# Altium footprint library WR-TBL_Pluggable Connector_5.08mm.PcbLib: 295 footprints (part 1 of 19)
Each footprint in its own frame and in the unit in brackets; x right, y up, seen from the top. Pads: shape width x height; smd on the part's side, far side on the other; paste and mask are expansions set on the pad; w line width, h text height; cw(c..) or ccw(c..) is an arc to the next point about the centre after c.
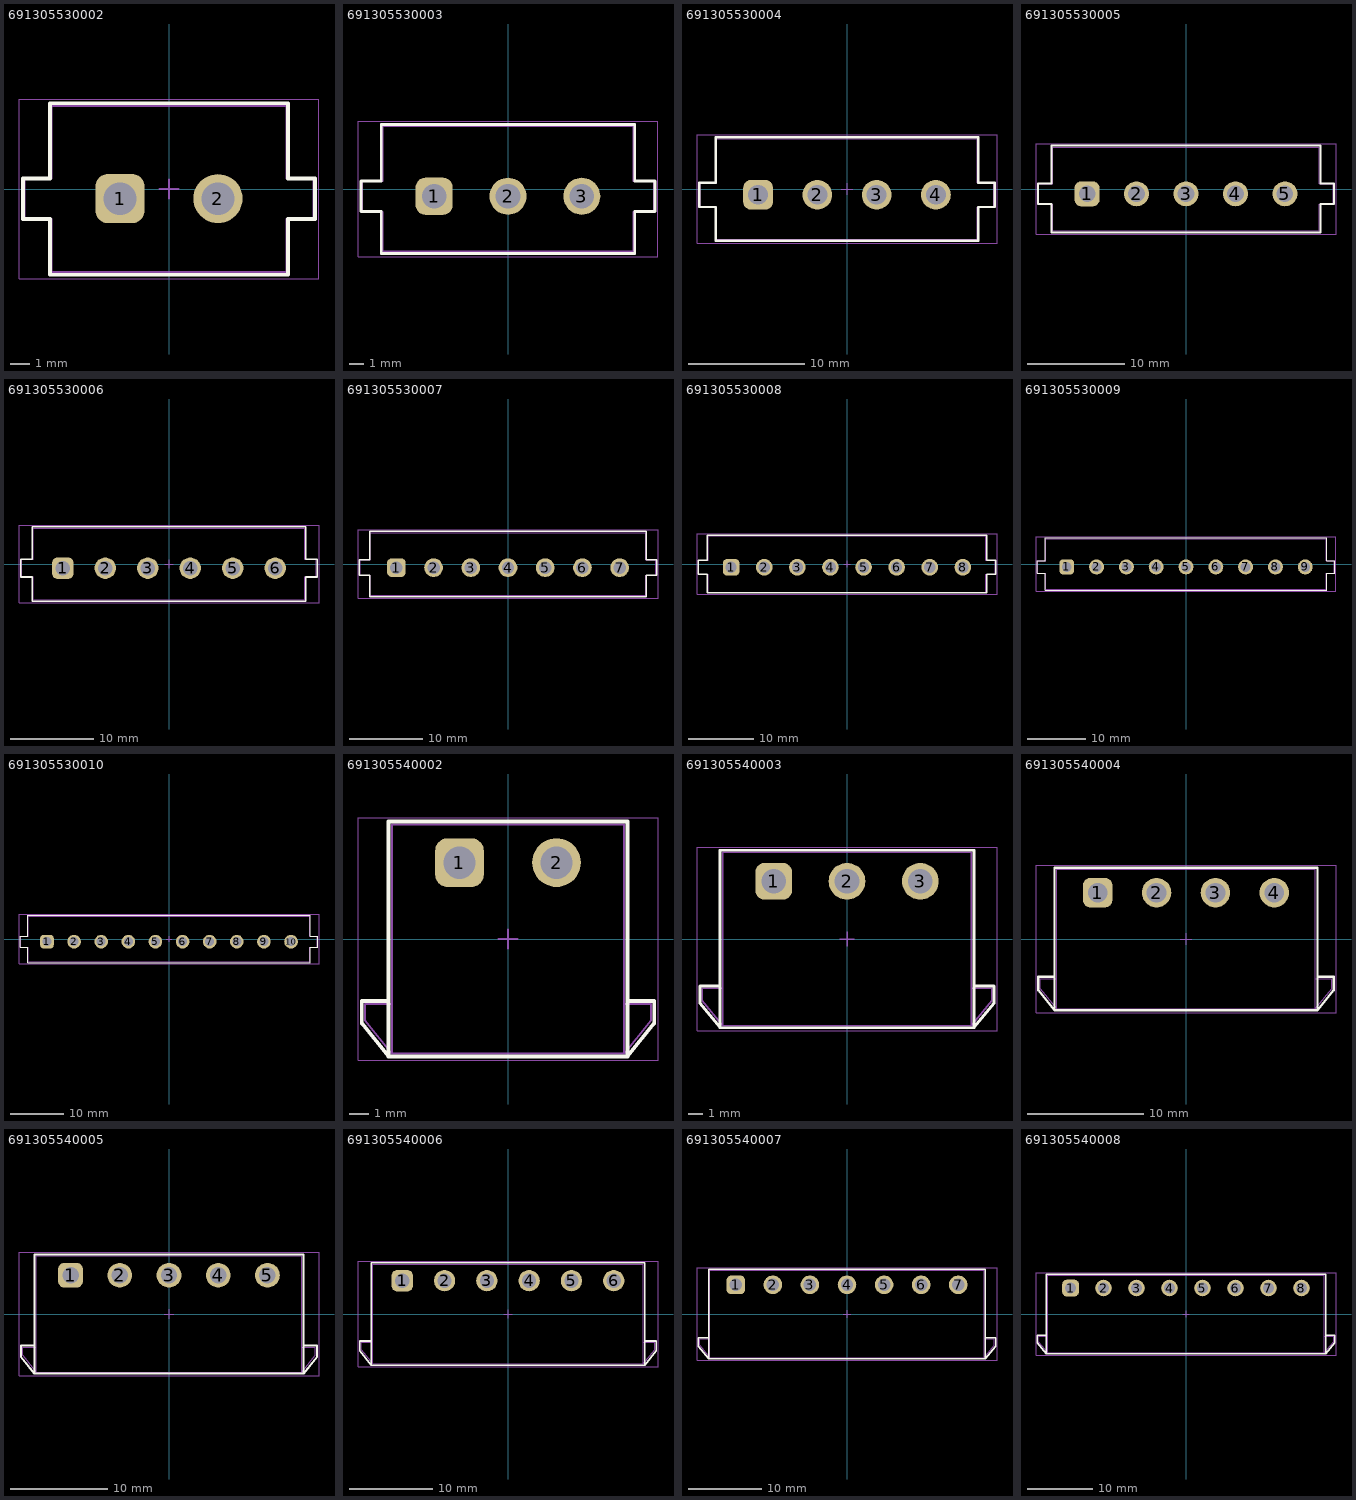
[diagram p0: the footprints below, top view; thin cyan lines are the x and y axes]

## 691305530002 [mm] "5.08mm Vertical PCB Header with Plastic ears, 2p"
height 12.3
pads (2):
  rrect50% 2.55x2.55 hole 1.7: 1(-2.54,-0.5)
  round 2.55 hole 1.7: 2(2.54,-0.5)
Top Overlay:
  lines w0.2: -7.58,-1.55 -6.18,-1.55 -6.18,-4.45 6.18,-4.45 6.18,-1.55 7.58,-1.55 7.58,0.55 6.18,0.55 6.18,4.45 -6.18,4.45 -6.18,0.55 -7.58,0.55 -7.58,-1.55
Top Assembly:
  lines w0.1: -7.48,-1.55 -6.08,-1.55 -6.08,-4.3 6.08,-4.3 6.08,-1.55 7.48,-1.55 7.48,0.55 6.08,0.55 6.08,4.3 -6.08,4.3 -6.08,0.55 -7.48,0.55 -7.48,-1.55
Top Designator:
  text ".Designator" at -3.647,-0.357 h1
Top 3D Body:
  lines w0.1: -7.48,-1.55 -7.48,0.55 -6.08,0.55 -6.08,4.3 6.08,4.3 6.08,0.55 7.48,0.55 7.48,-1.55 6.08,-1.55 6.08,-4.3 -6.08,-4.3 -6.08,-1.55 -7.48,-1.55
Top Courtyard:
  lines w0.05: -7.78,-4.65 7.78,-4.65 7.78,4.65 -7.78,4.65 -7.78,-4.65
Top Component Center:
  lines w0.1: -0.5,0 0.5,0 ; 0,-0.5 0,0.5
3D body "691305530002.stp": height 12.05, standoff -3.95, extent -7.48,-4.3 7.48,4.3

## 691305530003 [mm] "5.08mm Vertical PCB Header with Plastic ears, 3p"
height 12.3
pads (3):
  rrect50% 2.55x2.55 hole 1.7: 1(-5.08,-0.5)
  round 2.55 hole 1.7: 2(0,-0.5) 3(5.08,-0.5)
Top Overlay:
  lines w0.2: -10.12,-1.55 -10.12,0.55 -8.72,0.55 -8.72,4.45 8.72,4.45 8.72,0.55 10.12,0.55 10.12,-1.55 8.72,-1.55 8.72,-4.45 -8.72,-4.45 -8.72,-1.55 -10.12,-1.55
Top Assembly:
  lines w0.1: -10.02,-1.55 -10.02,0.55 -8.62,0.55 -8.62,4.3 8.62,4.3 8.62,0.55 10.02,0.55 10.02,-1.55 8.62,-1.55 8.62,-4.3 -8.62,-4.3 -8.62,-1.55 -10.02,-1.55
Top Designator:
  text ".Designator" at -3.647,-0.357 h1
Top 3D Body:
  lines w0.1: -10.02,-1.55 -8.62,-1.55 -8.62,-4.3 8.62,-4.3 8.62,-1.55 10.02,-1.55 10.02,0.55 8.62,0.55 8.62,4.3 -8.62,4.3 -8.62,0.55 -10.02,0.55 -10.02,-1.55
Top Courtyard:
  lines w0.05: -10.32,-4.65 -10.32,4.65 10.32,4.65 10.32,-4.65 -10.32,-4.65
Top Component Center:
  lines w0.1: -0.5,0 0.5,0 ; 0,-0.5 0,0.5
3D body "691305530003.stp": height 12.05, standoff -3.95, extent -10.02,-4.3 10.02,4.3

## 691305530004 [mm] "5.08mm Vertical PCB Header with Plastic ears, 4p"
height 12.3
pads (4):
  rrect50% 2.55x2.55 hole 1.7: 1(-7.62,-0.5)
  round 2.55 hole 1.7: 2(-2.54,-0.5) 3(2.54,-0.5) 4(7.62,-0.5)
Top Overlay:
  lines w0.2: -12.66,-1.55 -12.66,0.55 -11.26,0.55 -11.26,4.45 11.26,4.45 11.26,0.55 12.66,0.55 12.66,-1.55 11.26,-1.55 11.26,-4.45 -11.26,-4.45 -11.26,-1.55 -12.66,-1.55
Top Assembly:
  lines w0.1: -12.56,-1.55 -12.56,0.55 -11.16,0.55 -11.16,4.3 11.16,4.3 11.16,0.55 12.56,0.55 12.56,-1.55 11.16,-1.55 11.16,-4.3 -11.16,-4.3 -11.16,-1.55 -12.56,-1.55
Top Designator:
  text ".Designator" at -3.647,-0.357 h1
Top 3D Body:
  lines w0.1: -12.56,-1.55 -11.16,-1.55 -11.16,-4.3 11.16,-4.3 11.16,-1.55 12.56,-1.55 12.56,0.55 11.16,0.55 11.16,4.3 -11.16,4.3 -11.16,0.55 -12.56,0.55 -12.56,-1.55
Top Courtyard:
  lines w0.05: -12.86,-4.65 -12.86,4.65 12.86,4.65 12.86,-4.65 -12.86,-4.65
Top Component Center:
  lines w0.1: -0.5,0 0.5,0 ; 0,-0.5 0,0.5
3D body "691305530004.stp": height 12.05, standoff -3.95, extent -12.56,-4.3 12.56,4.3

## 691305530005 [mm] "5.08mm Vertical PCB Header with Plastic ears, 5p"
height 12.3
pads (5):
  rrect50% 2.55x2.55 hole 1.7: 1(-10.16,-0.5)
  round 2.55 hole 1.7: 2(-5.08,-0.5) 3(0,-0.5) 4(5.08,-0.5) 5(10.16,-0.5)
Top Overlay:
  lines w0.2: -15.2,-1.55 -15.2,0.55 -13.8,0.55 -13.8,4.45 13.8,4.45 13.8,0.55 15.2,0.55 15.2,-1.55 13.8,-1.55 13.8,-4.45 -13.8,-4.45 -13.8,-1.55 -15.2,-1.55
Top Assembly:
  lines w0.1: -15.1,-1.55 -15.1,0.55 -13.7,0.55 -13.7,4.3 13.7,4.3 13.7,0.55 15.1,0.55 15.1,-1.55 13.7,-1.55 13.7,-4.3 -13.7,-4.3 -13.7,-1.55 -15.1,-1.55
Top Designator:
  text ".Designator" at -3.647,-0.357 h1
Top 3D Body:
  lines w0.1: -15.1,-1.55 -13.7,-1.55 -13.7,-4.3 13.7,-4.3 13.7,-1.55 15.1,-1.55 15.1,0.55 13.7,0.55 13.7,4.3 -13.7,4.3 -13.7,0.55 -15.1,0.55 -15.1,-1.55
Top Courtyard:
  lines w0.05: -15.4,-4.65 -15.4,4.65 15.4,4.65 15.4,-4.65 -15.4,-4.65
Top Component Center:
  lines w0.1: -0.5,0 0.5,0 ; 0,-0.5 0,0.5
3D body "691305530005.stp": height 12.05, standoff -3.95, extent -15.1,-4.3 15.1,4.3

## 691305530006 [mm] "5.08mm Vertical PCB Header with Plastic ears, 6p"
height 12.3
pads (6):
  rrect50% 2.55x2.55 hole 1.7: 1(-12.7,-0.5)
  round 2.55 hole 1.7: 2(-7.62,-0.5) 3(-2.54,-0.5) 4(2.54,-0.5) 5(7.62,-0.5) 6(12.7,-0.5)
Top Overlay:
  lines w0.2: -17.74,-1.55 -17.74,0.55 -16.34,0.55 -16.34,4.45 16.34,4.45 16.34,0.55 17.74,0.55 17.74,-1.55 16.34,-1.55 16.34,-4.45 -16.34,-4.45 -16.34,-1.55 -17.74,-1.55
Top Assembly:
  lines w0.1: -17.64,-1.55 -17.64,0.55 -16.24,0.55 -16.24,4.3 16.24,4.3 16.24,0.55 17.64,0.55 17.64,-1.55 16.24,-1.55 16.24,-4.3 -16.24,-4.3 -16.24,-1.55 -17.64,-1.55
Top Designator:
  text ".Designator" at -3.647,-0.357 h1
Top 3D Body:
  lines w0.1: -17.64,-1.55 -16.24,-1.55 -16.24,-4.3 16.24,-4.3 16.24,-1.55 17.64,-1.55 17.64,0.55 16.24,0.55 16.24,4.3 -16.24,4.3 -16.24,0.55 -17.64,0.55 -17.64,-1.55
Top Courtyard:
  lines w0.05: -17.94,-4.65 -17.94,4.65 17.94,4.65 17.94,-4.65 -17.94,-4.65
Top Component Center:
  lines w0.1: -0.5,0 0.5,0 ; 0,-0.5 0,0.5
3D body "691305530006.stp": height 12.05, standoff -3.95, extent -17.64,-4.3 17.64,4.3

## 691305530007 [mm] "5.08mm Vertical PCB Header with Plastic ears, 7p"
height 12.3
pads (7):
  rrect50% 2.55x2.55 hole 1.7: 1(-15.24,-0.5)
  round 2.55 hole 1.7: 2(-10.16,-0.5) 3(-5.08,-0.5) 4(0,-0.5) 5(5.08,-0.5) 6(10.16,-0.5) 7(15.24,-0.5)
Top Overlay:
  lines w0.2: -20.28,-1.55 -18.88,-1.55 -18.88,-4.45 18.88,-4.45 18.88,-1.55 20.28,-1.55 20.28,0.55 18.88,0.55 18.88,4.45 -18.88,4.45 -18.88,0.55 -20.28,0.55 -20.28,-1.55
Top Assembly:
  lines w0.1: -20.18,-1.55 -18.78,-1.55 -18.78,-4.3 18.78,-4.3 18.78,-1.55 20.18,-1.55 20.18,0.55 18.78,0.55 18.78,4.3 -18.78,4.3 -18.78,0.55 -20.18,0.55 -20.18,-1.55
Top Designator:
  text ".Designator" at -3.647,-0.357 h1
Top 3D Body:
  lines w0.1: -20.18,-1.55 -20.18,0.55 -18.78,0.55 -18.78,4.3 18.78,4.3 18.78,0.55 20.18,0.55 20.18,-1.55 18.78,-1.55 18.78,-4.3 -18.78,-4.3 -18.78,-1.55 -20.18,-1.55
Top Courtyard:
  lines w0.05: -20.48,-4.65 20.48,-4.65 20.48,4.65 -20.48,4.65 -20.48,-4.65
Top Component Center:
  lines w0.1: -0.5,0 0.5,0 ; 0,-0.5 0,0.5
3D body "691305530007.stp": height 12.05, standoff -3.95, extent -20.18,-4.3 20.18,4.3

## 691305530008 [mm] "5.08mm Vertical PCB Header with Plastic ears, 8p"
height 12.3
pads (8):
  rrect50% 2.55x2.55 hole 1.7: 1(-17.78,-0.5)
  round 2.55 hole 1.7: 2(-12.7,-0.5) 3(-7.62,-0.5) 4(-2.54,-0.5) 5(2.54,-0.5) 6(7.62,-0.5) 7(12.7,-0.5) 8(17.78,-0.5)
Top Overlay:
  lines w0.2: -22.82,-1.55 -22.82,0.55 -21.42,0.55 -21.42,4.45 21.42,4.45 21.42,0.55 22.82,0.55 22.82,-1.55 21.42,-1.55 21.42,-4.45 -21.42,-4.45 -21.42,-1.55 -22.82,-1.55
Top Assembly:
  lines w0.1: -22.72,-1.55 -22.72,0.55 -21.32,0.55 -21.32,4.3 21.32,4.3 21.32,0.55 22.72,0.55 22.72,-1.55 21.32,-1.55 21.32,-4.3 -21.32,-4.3 -21.32,-1.55 -22.72,-1.55
Top Designator:
  text ".Designator" at -3.647,-0.357 h1
Top 3D Body:
  lines w0.1: -22.72,-1.55 -21.32,-1.55 -21.32,-4.3 21.32,-4.3 21.32,-1.55 22.72,-1.55 22.72,0.55 21.32,0.55 21.32,4.3 -21.32,4.3 -21.32,0.55 -22.72,0.55 -22.72,-1.55
Top Courtyard:
  lines w0.05: -23.02,-4.65 -23.02,4.65 23.02,4.65 23.02,-4.65 -23.02,-4.65
Top Component Center:
  lines w0.1: -0.5,0 0.5,0 ; 0,-0.5 0,0.5
3D body "691305530008.stp": height 12.05, standoff -3.95, extent -22.72,-4.3 22.72,4.3

## 691305530009 [mm] "5.08mm Vertical PCB Header with Plastic ears, 9p"
height 12.3
pads (9):
  rrect50% 2.55x2.55 hole 1.7: 1(-20.32,-0.5)
  round 2.55 hole 1.7: 2(-15.24,-0.5) 3(-10.16,-0.5) 4(-5.08,-0.5) 5(0,-0.5) 6(5.08,-0.5) 7(10.16,-0.5) 8(15.24,-0.5) 9(20.32,-0.5)
Top Overlay:
  lines w0.2: -25.36,-1.55 -25.36,0.55 -23.96,0.55 -23.96,4.45 23.96,4.45 23.96,0.55 25.36,0.55 25.36,-1.55 23.96,-1.55 23.96,-4.45 -23.96,-4.45 -23.96,-1.55 -25.36,-1.55
Top Assembly:
  lines w0.1: -25.26,-1.55 -25.26,0.55 -23.86,0.55 -23.86,4.3 23.86,4.3 23.86,0.55 25.26,0.55 25.26,-1.55 23.86,-1.55 23.86,-4.3 -23.86,-4.3 -23.86,-1.55 -25.26,-1.55
Top Designator:
  text ".Designator" at -3.647,-0.357 h1
Top 3D Body:
  lines w0.1: -25.26,-1.55 -23.86,-1.55 -23.86,-4.3 23.86,-4.3 23.86,-1.55 25.26,-1.55 25.26,0.55 23.86,0.55 23.86,4.3 -23.86,4.3 -23.86,0.55 -25.26,0.55 -25.26,-1.55
Top Courtyard:
  lines w0.05: -25.56,-4.65 -25.56,4.65 25.56,4.65 25.56,-4.65 -25.56,-4.65
Top Component Center:
  lines w0.1: -0.5,0 0.5,0 ; 0,-0.5 0,0.5
3D body "691305530009.stp": height 12.05, standoff -3.95, extent -25.26,-4.3 25.26,4.3

## 691305530010 [mm] "5.08mm Vertical PCB Header with Plastic ears, 10p"
height 12.3
pads (10):
  rrect50% 2.55x2.55 hole 1.7: 1(-22.86,-0.5)
  round 2.55 hole 1.7: 2(-17.78,-0.5) 3(-12.7,-0.5) 4(-7.62,-0.5) 5(-2.54,-0.5) 6(2.54,-0.5) 7(7.62,-0.5) 8(12.7,-0.5) 9(17.78,-0.5) 10(22.86,-0.5)
Top Overlay:
  lines w0.2: -27.9,-1.55 -26.5,-1.55 -26.5,-4.45 26.5,-4.45 26.5,-1.55 27.9,-1.55 27.9,0.55 26.5,0.55 26.5,4.45 -26.5,4.45 -26.5,0.55 -27.9,0.55 -27.9,-1.55
Top Assembly:
  lines w0.1: -27.8,-1.55 -26.4,-1.55 -26.4,-4.3 26.4,-4.3 26.4,-1.55 27.8,-1.55 27.8,0.55 26.4,0.55 26.4,4.3 -26.4,4.3 -26.4,0.55 -27.8,0.55 -27.8,-1.55
Top Designator:
  text ".Designator" at -3.647,-0.357 h1
Top 3D Body:
  lines w0.1: -27.8,-1.55 -27.8,0.55 -26.4,0.55 -26.4,4.3 26.4,4.3 26.4,0.55 27.8,0.55 27.8,-1.55 26.4,-1.55 26.4,-4.3 -26.4,-4.3 -26.4,-1.55 -27.8,-1.55
Top Courtyard:
  lines w0.05: -28.1,-4.65 28.1,-4.65 28.1,4.65 -28.1,4.65 -28.1,-4.65
Top Component Center:
  lines w0.1: -0.5,0 0.5,0 ; 0,-0.5 0,0.5
3D body "691305530010.stp": height 12.05, standoff -3.95, extent -27.8,-4.3 27.8,4.3

## 691305540002 [mm] "5,08mm - PCB Header Horizontal Entry with Plastic Latches - 02p"
height 8.9
pads (2):
  rrect50% 2.55x2.55 hole 1.7: 1(-2.54,4)
  round 2.55 hole 1.7: 2(2.54,4)
Top Overlay:
  lines w0.2: -6.255,-3.25 -7.655,-3.25 -7.655,-4.421 -6.255,-6.15 ; 6.255,-3.25 7.655,-3.25 7.655,-4.421 6.255,-6.15 ; -6.255,-6.15 -6.255,6.15 6.255,6.15 6.255,-6.15 ; -6.255,-6.15 6.255,-6.15
Top Assembly:
  lines w0.1: -6.08,-3.411 -7.48,-3.411 -7.48,-4.271 -6.08,-6 ; 6.08,-3.411 7.48,-3.411 7.48,-4.271 6.08,-6 ; -6.08,-6 6.08,-6 ; -6.08,-6 -6.08,6 6.08,6 6.08,-6
Top Designator:
  text ".Designator" at -3.647,-0.357 h1
Top 3D Body:
  lines w0.1: -6.08,-3.411 -7.48,-3.411 -7.48,-4.271 -6.08,-6 ; 6.08,-3.411 7.48,-3.411 7.48,-4.271 6.08,-6 ; -6.08,-6 -6.08,6 6.08,6 6.08,-6 ; -6.08,-6 6.08,-6
Top Courtyard:
  lines w0.05: -7.855,-6.35 -7.855,6.35 7.855,6.35 7.855,-6.35 -7.855,-6.35
Top Component Center:
  lines w0.1: -0.5,0 0.5,0 ; 0,-0.5 0,0.5
3D body "691305540002.stp": height 8.63, standoff -3.97, extent -7.48,-6 7.48,6

## 691305540003 [mm] "5,08mm - PCB Header Horizontal Entry with Plastic Latches - 03p"
height 8.9
pads (3):
  rrect50% 2.55x2.55 hole 1.7: 1(-5.08,4)
  round 2.55 hole 1.7: 2(0,4) 3(5.08,4)
Top Overlay:
  lines w0.2: -8.795,-3.25 -10.195,-3.25 -10.195,-4.421 -8.795,-6.15 ; 8.795,-3.25 10.195,-3.25 10.195,-4.421 8.795,-6.15 ; -8.795,-6.15 -8.795,6.15 8.795,6.15 8.795,-6.15 ; -8.795,-6.15 8.795,-6.15
Top Assembly:
  lines w0.1: -8.62,-3.411 -10.02,-3.411 -10.02,-4.271 -8.62,-6 ; 8.62,-3.411 10.02,-3.411 10.02,-4.271 8.62,-6 ; -8.62,-6 8.62,-6 ; -8.62,-6 -8.62,6 8.62,6 8.62,-6
Top Designator:
  text ".Designator" at -3.647,-0.357 h1
Top 3D Body:
  lines w0.1: -8.62,-3.411 -10.02,-3.411 -10.02,-4.271 -8.62,-6 ; 8.62,-3.411 10.02,-3.411 10.02,-4.271 8.62,-6 ; -8.62,-6 -8.62,6 8.62,6 8.62,-6 ; -8.62,-6 8.62,-6
Top Courtyard:
  lines w0.05: -10.395,-6.35 -10.395,6.35 10.395,6.35 10.395,-6.35 -10.395,-6.35
Top Component Center:
  lines w0.1: -0.5,0 0.5,0 ; 0,-0.5 0,0.5
3D body "691305540003.stp": height 8.63, standoff -3.97, extent -10.02,-6 10.02,6

## 691305540004 [mm] "5,08mm - PCB Header Horizontal Entry with Plastic Latches - 04p"
height 8.9
pads (4):
  rrect50% 2.55x2.55 hole 1.7: 1(-7.62,4)
  round 2.55 hole 1.7: 2(-2.54,4) 3(2.54,4) 4(7.62,4)
Top Overlay:
  lines w0.2: -11.335,-3.25 -12.735,-3.25 -12.735,-4.421 -11.335,-6.15 ; 11.335,-3.25 12.735,-3.25 12.735,-4.421 11.335,-6.15 ; -11.335,-6.15 -11.335,6.15 11.335,6.15 11.335,-6.15 ; -11.335,-6.15 11.335,-6.15
Top Assembly:
  lines w0.1: -11.16,-3.411 -12.56,-3.411 -12.56,-4.271 -11.16,-6 ; 11.16,-3.411 12.56,-3.411 12.56,-4.271 11.16,-6 ; -11.16,-6 11.16,-6 ; -11.16,-6 -11.16,6 11.16,6 11.16,-6
Top Designator:
  text ".Designator" at -3.647,-0.357 h1
Top 3D Body:
  lines w0.1: -11.16,-3.411 -12.56,-3.411 -12.56,-4.271 -11.16,-6 ; 11.16,-3.411 12.56,-3.411 12.56,-4.271 11.16,-6 ; -11.16,-6 -11.16,6 11.16,6 11.16,-6 ; -11.16,-6 11.16,-6
Top Courtyard:
  lines w0.05: -12.935,-6.35 -12.935,6.35 12.935,6.35 12.935,-6.35 -12.935,-6.35
Top Component Center:
  lines w0.1: -0.5,0 0.5,0 ; 0,-0.5 0,0.5
3D body "691305540004.stp": height 8.63, standoff -3.97, extent -12.56,-6 12.56,6

## 691305540005 [mm] "5,08mm - PCB Header Horizontal Entry with Plastic Latches - 05p"
height 8.9
pads (5):
  rrect50% 2.55x2.55 hole 1.7: 1(-10.16,4)
  round 2.55 hole 1.7: 2(-5.08,4) 3(0,4) 4(5.08,4) 5(10.16,4)
Top Overlay:
  lines w0.2: -13.875,-3.25 -15.275,-3.25 -15.275,-4.421 -13.875,-6.15 ; 13.875,-3.25 15.275,-3.25 15.275,-4.421 13.875,-6.15 ; -13.875,-6.15 -13.875,6.15 13.875,6.15 13.875,-6.15 ; -13.875,-6.15 13.875,-6.15
Top Assembly:
  lines w0.1: -13.7,-3.411 -15.1,-3.411 -15.1,-4.271 -13.7,-6 ; 13.7,-3.411 15.1,-3.411 15.1,-4.271 13.7,-6 ; -13.7,-6 13.7,-6 ; -13.7,-6 -13.7,6 13.7,6 13.7,-6
Top Designator:
  text ".Designator" at -3.647,-0.357 h1
Top 3D Body:
  lines w0.1: -13.7,-3.411 -15.1,-3.411 -15.1,-4.271 -13.7,-6 ; 13.7,-3.411 15.1,-3.411 15.1,-4.271 13.7,-6 ; -13.7,-6 -13.7,6 13.7,6 13.7,-6 ; -13.7,-6 13.7,-6
Top Courtyard:
  lines w0.05: -15.475,-6.35 -15.475,6.35 15.475,6.35 15.475,-6.35 -15.475,-6.35
Top Component Center:
  lines w0.1: -0.5,0 0.5,0 ; 0,-0.5 0,0.5
3D body "691305540005.stp": height 8.63, standoff -3.97, extent -15.1,-6 15.1,6

## 691305540006 [mm] "5,08mm - PCB Header Horizontal Entry with Plastic Latches - 06p"
height 8.9
pads (6):
  rrect50% 2.55x2.55 hole 1.7: 1(-12.7,4)
  round 2.55 hole 1.7: 2(-7.62,4) 3(-2.54,4) 4(2.54,4) 5(7.62,4) 6(12.7,4)
Top Overlay:
  lines w0.2: -16.415,-3.25 -17.815,-3.25 -17.815,-4.421 -16.415,-6.15 ; 16.415,-3.25 17.815,-3.25 17.815,-4.421 16.415,-6.15 ; -16.415,-6.15 16.415,-6.15 ; -16.415,-6.15 -16.415,6.15 16.415,6.15 16.415,-6.15
Top Assembly:
  lines w0.1: -16.24,-3.411 -17.64,-3.411 -17.64,-4.271 -16.24,-6 ; 16.24,-3.411 17.64,-3.411 17.64,-4.271 16.24,-6 ; -16.24,-6 -16.24,6 16.24,6 16.24,-6 ; -16.24,-6 16.24,-6
Top Designator:
  text ".Designator" at -3.647,-0.357 h1
Top 3D Body:
  lines w0.1: -16.24,-3.411 -17.64,-3.411 -17.64,-4.271 -16.24,-6 ; 16.24,-3.411 17.64,-3.411 17.64,-4.271 16.24,-6 ; -16.24,-6 16.24,-6 ; -16.24,-6 -16.24,6 16.24,6 16.24,-6
Top Courtyard:
  lines w0.05: -18.015,-6.35 18.015,-6.35 18.015,6.35 -18.015,6.35 -18.015,-6.35
Top Component Center:
  lines w0.1: -0.5,0 0.5,0 ; 0,-0.5 0,0.5
3D body "691305540006.stp": height 8.63, standoff -3.97, extent -17.64,-6 17.64,6

## 691305540007 [mm] "5,08mm - PCB Header Horizontal Entry with Plastic Latches - 07p"
height 8.9
pads (7):
  rrect50% 2.55x2.55 hole 1.7: 1(-15.24,4)
  round 2.55 hole 1.7: 2(-10.16,4) 3(-5.08,4) 4(0,4) 5(5.08,4) 6(10.16,4) 7(15.24,4)
Top Overlay:
  lines w0.2: -18.955,-3.25 -20.355,-3.25 -20.355,-4.421 -18.955,-6.15 ; 18.955,-3.25 20.355,-3.25 20.355,-4.421 18.955,-6.15 ; -18.955,-6.15 18.955,-6.15 ; -18.955,-6.15 -18.955,6.15 18.955,6.15 18.955,-6.15
Top Assembly:
  lines w0.1: -18.78,-3.411 -20.18,-3.411 -20.18,-4.271 -18.78,-6 ; 18.78,-3.411 20.18,-3.411 20.18,-4.271 18.78,-6 ; -18.78,-6 -18.78,6 18.78,6 18.78,-6 ; -18.78,-6 18.78,-6
Top Designator:
  text ".Designator" at -3.647,-0.357 h1
Top 3D Body:
  lines w0.1: -18.78,-3.411 -20.18,-3.411 -20.18,-4.271 -18.78,-6 ; 18.78,-3.411 20.18,-3.411 20.18,-4.271 18.78,-6 ; -18.78,-6 18.78,-6 ; -18.78,-6 -18.78,6 18.78,6 18.78,-6
Top Courtyard:
  lines w0.05: -20.555,-6.35 20.555,-6.35 20.555,6.35 -20.555,6.35 -20.555,-6.35
Top Component Center:
  lines w0.1: -0.5,0 0.5,0 ; 0,-0.5 0,0.5
3D body "691305540007.stp": height 8.63, standoff -3.97, extent -20.18,-6 20.18,6

## 691305540008 [mm] "5,08mm - PCB Header Horizontal Entry with Plastic Latches - 08p"
height 8.9
pads (8):
  rrect50% 2.55x2.55 hole 1.7: 1(-17.78,4)
  round 2.55 hole 1.7: 2(-12.7,4) 3(-7.62,4) 4(-2.54,4) 5(2.54,4) 6(7.62,4) 7(12.7,4) 8(17.78,4)
Top Overlay:
  lines w0.2: -21.495,-3.25 -22.895,-3.25 -22.895,-4.421 -21.495,-6.15 ; 21.495,-3.25 22.895,-3.25 22.895,-4.421 21.495,-6.15 ; -21.495,-6.15 -21.495,6.15 21.495,6.15 21.495,-6.15 ; -21.495,-6.15 21.495,-6.15
Top Assembly:
  lines w0.1: -21.32,-3.411 -22.72,-3.411 -22.72,-4.271 -21.32,-6 ; 21.32,-3.411 22.72,-3.411 22.72,-4.271 21.32,-6 ; -21.32,-6 21.32,-6 ; -21.32,-6 -21.32,6 21.32,6 21.32,-6
Top Designator:
  text ".Designator" at -3.647,-0.357 h1
Top 3D Body:
  lines w0.1: -21.32,-3.411 -22.72,-3.411 -22.72,-4.271 -21.32,-6 ; 21.32,-3.411 22.72,-3.411 22.72,-4.271 21.32,-6 ; -21.32,-6 -21.32,6 21.32,6 21.32,-6 ; -21.32,-6 21.32,-6
Top Courtyard:
  lines w0.05: -23.095,-6.35 -23.095,6.35 23.095,6.35 23.095,-6.35 -23.095,-6.35
Top Component Center:
  lines w0.1: -0.5,0 0.5,0 ; 0,-0.5 0,0.5
3D body "691305540008.stp": height 8.63, standoff -3.97, extent -22.72,-6 22.72,6